# EAGLE library part PINH6 (library card_dac_3d)
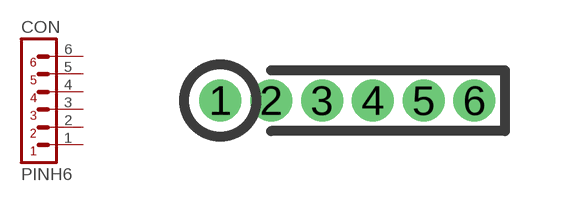
[diagram p0: symbol with the pads of 1X6IDC_1R27; footprint 1X6IDC_1R27]

Designator prefix CON

## PINH6IDC  [1X6IDC_1R27]
1  1  pas
2  2  pas
3  3  pas
4  4  pas
5  5  pas
6  6  pas

## Footprint 1X6IDC_1R27 (pad centres in mm)
drill 0.5 pad 1.05: 1 -3.81,0; 2 -2.54,0; 3 -1.27,0; 4 0,0; 5 1.27,0; 6 2.54,0